# Altium schematic symbol library CD74HC4514MG4.SchLib: 1 symbol
Pins are listed as number, name and electrical type; pins without a type are passive.

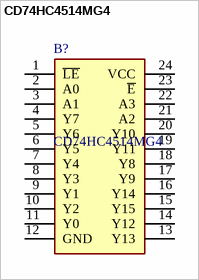
[diagram p0: symbol CD74HC4514MG4]

## CD74HC4514MG4
designator B?
Encoders, Decoders, Multiplexers & Demultiplexers Hi Spd CMOS Log 4-16 Line Decoder/Demult; Manufacturer_Name: Texas Instruments; Geometry.Height: 2.65mm; Manufacturer_Part_Number: CD74HC4514MG4; Mouser Part Number: 595-CD74HC4514MG4; Mouser Price/Stock: https://www.mouser.com/Search/Refine.aspx?Keyword=595-CD74HC4514MG4; Arrow Part Number: CD74HC4514MG4; Arrow Price/Stock: https://www.arrow.com/en/products/cd74hc4514mg4/texas-instruments; Datasheet Link: https://www.ti.com/lit/ds/symlink/cd74hc4514.pdf?HQS=dis-mous-null-mousermode-dsf-pf-null-wwe&ts=1619004310018&ref_url=https%253A%252F%252Fwww.mouser.in%252F
footprint SOIC127P1030X265-24N
pins: 1 ~{LE}, 2 A0, 3 A1, 4 Y7, 5 Y6, 6 Y5, 7 Y4, 8 Y3, 9 Y1, 10 Y2, 11 Y0, 12 GND, 13 Y13, 14 Y12, 15 Y15, 16 Y14, 17 Y9, 18 Y8, 19 Y11, 20 Y10, 21 A2, 22 A3, 23 ~{E}, 24 VCC